# Altium footprint library PBL - SMD Packages.PcbLib: 148 footprints (part 3 of 10)
Each footprint in its own frame and in the unit in brackets; x right, y up, seen from the top. Pads: shape width x height; smd on the part's side, far side on the other; paste and mask are expansions set on the pad; w line width, h text height; cw(c..) or ccw(c..) is an arc to the next point about the centre after c.
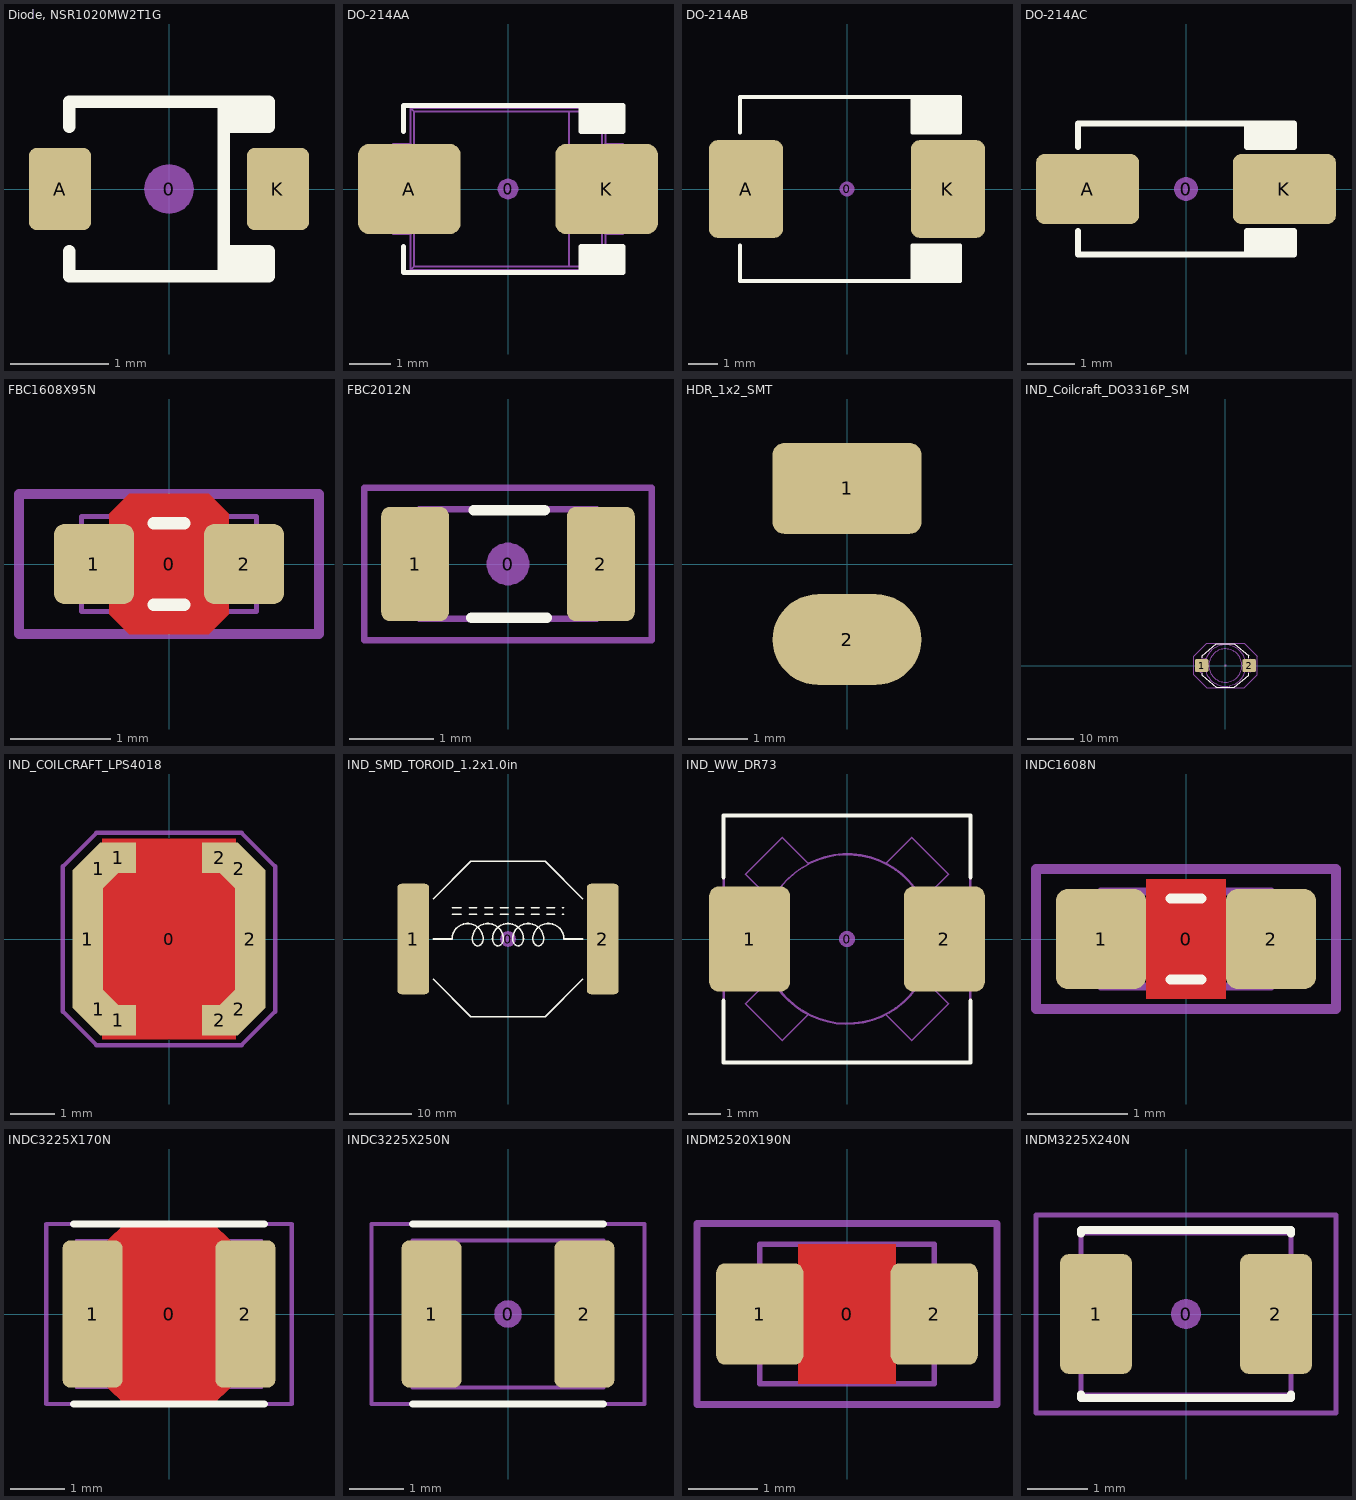
[diagram p2: the footprints below, top view; thin cyan lines are the x and y axes]

## Diode, NSR1020MW2T1G [mil]
pads (3):
  round 20 on Mech15: 0(0,0)
  rrect25% 25x33 smd: A(-43.75,0) K(43.75,0)
Top Overlay:
  lines w5: -40,-25 -40,-35 40,-35 40,-25 22,-25 ; -40,25 -40,35 40,35 40,25 22,25 ; 22,-35 22,35 ; 25,-35 25,-25 ; 25,25 25,35 ; 28,-35 28,-25 ; 28,25 28,35 ; 31,-35 31,-25 ; 31,25 31,35 ; 34,-35 34,-25 ; 34,25 34,35 ; 37,-35 37,-25 ; 37,25 37,35

## DO-214AA [mm] "JEDEC DO214 variation AA. SMB"
height 2.65
pads (3):
  round 0.508 on Mech15: 0(0,0)
  rrect25% 2.5x2.2 smd: A(-2.4,0) K(2.4,0)
Top Overlay:
  region: 1.778,1.397 1.778,2.032 2.794,2.032 2.794,1.397
  region: 1.778,-1.397 1.778,-2.032 2.794,-2.032 2.794,-1.397
  lines w0.127: -2.54,-1.397 -2.54,-2.032 1.778,-2.032 ; -2.54,1.397 -2.54,2.032 1.778,2.032 ; 1.778,-2.032 1.778,-1.397 2.794,-1.397 2.794,-2.032 1.778,-2.032 ; 1.778,2.032 2.794,2.032 2.794,1.397 1.778,1.397 1.778,2.032
13 - 3D Top Side:
  lines w0.05: -2.375,-1.1 -2.375,-1.973 ; -2.375,1.1 -2.375,1.973 ; 2.375,-1.1 2.375,-1.973 ; 2.375,1.1 2.375,1.973 ; -2.375,-1.973 -2.373,-1.975 2.373,-1.975 2.375,-1.973 ; -2.375,-1.973 -2.285,-1.883 ; -2.375,1.973 -2.373,1.975 2.373,1.975 2.375,1.973 ; -2.375,1.973 -2.285,1.883 ; -2.285,-1.883 1.485,-1.884 ; -2.285,-1.883 -2.285,1.883 ; -2.285,1.883 1.485,1.884 ; 1.485,-1.884 2.285,-1.884 ; 1.485,-1.884 1.485,1.884 ; 1.485,1.884 2.285,1.884 ; 2.285,-1.884 2.285,1.884 ; 2.285,-1.884 2.375,-1.973 ; 2.285,1.884 2.375,1.973 ; -2.8,-1.1 -2.356,-1.1 -2.356,1.1 -2.8,1.1 -2.8,-1.1 ; 2.356,-1.1 2.8,-1.1 2.8,1.1 2.356,1.1 2.356,-1.1
3D body: height 2.62, standoff 0, extent -2.8,-1.975 2.8,1.975

## DO-214AB [mm] "JEDEC DO214 variation AB. SMC"
height 2.5
pads (3):
  round 0.508 on Mech15: 0(0,0)
  rrect25% 2.5x3.3 smd: A(-3.4,0) K(3.4,0)
Top Overlay:
  rectangle: 2.2,1.9 3.8,3.1
  rectangle: 2.2,-3.1 3.8,-1.9
  lines w0.127: -3.6,-1.9 -3.6,-3.1 3.8,-3.1 3.8,-1.9 2.2,-1.9 2.2,-3.1 ; -3.6,1.9 -3.6,3.1 3.8,3.1 3.8,1.9 2.2,1.9 2.2,3.1
3D body: height 2.62, standoff 0.01, extent -3.975,-2.975 4.05,2.975

## DO-214AC [mm] "JEDEC DO214 variation AC. SMA"
height 2.5
pads (3):
  round 0.508 on Mech15: 0(0,0)
  rrect25% 2.2x1.5 smd: A(-2.1,0) K(2.1,0)
Top Overlay:
  rectangle: 1.3,-1.4 2.3,-0.9
  rectangle: 1.3,0.9 2.3,1.4
  lines w0.127: -2.3,-0.9 -2.3,-1.4 2.3,-1.4 2.3,-0.9 1.3,-0.9 1.3,-1.4 ; -2.3,0.9 -2.3,1.4 2.3,1.4 2.3,0.9 1.3,0.9 ; 1.3,0.911 1.3,1.4
3D body: height 2.42, standoff 0.02, extent -2.6,-1.3 2.6,1.3

## FBC1608X95N [mm] "Chip Ferrite, Body 1.6x0.8mm, 0603, IPC Medium Density"
height 0.95
pads (3):
  round 0.254 on Mech15: 0(0,0)
  rrect25% 0.8x0.8 smd: 1(-0.75,0) 2(0.75,0)
Top Layer:
  pour cut-out: -0.6,0.5 -0.4,0.7 0.4,0.7 0.6,0.5 0.6,-0.5 0.4,-0.7 -0.4,-0.7 -0.6,-0.5
Top Overlay:
  lines w0.127: -0.152,-0.406 0.152,-0.406 ; -0.152,0.406 0.152,0.406
13 - 3D Top Side:
  lines w0.05: -0.475,-0.475 -0.475,0.475 ; 0.475,-0.475 0.475,0.475 ; -0.875,-0.475 0.875,-0.475 0.875,0.475 -0.875,0.475 -0.875,-0.475
15 - Top Courtyards:
  lines w0.1: -1.5,-0.7 -1.5,0.7 1.5,0.7 1.5,-0.7 -1.5,-0.7
3D body: height 0.95, standoff 0, extent -0.875,-0.475 0.875,0.475

## FBC2012N [mm] "Ferrite Bead Chip, Body 2.0x1.2mm, 0805, IPC Medium Density"
height 0.9
pads (3):
  round 0.508 on Mech15: 0(0,0)
  rrect25% 0.8x1.35 smd: 1(-1.1,0) 2(1.1,0)
Top Overlay:
  lines w0.127: -0.432,-0.635 0.457,-0.635 ; -0.406,0.635 0.432,0.635
13 - 3D Top Side:
  lines w0.076: -1.05,-0.65 -1.05,0.65 1.05,0.65 1.05,-0.65 -1.05,-0.65
15 - Top Courtyards:
  lines w0.076: -1.7,-0.9 -1.7,0.9 1.7,0.9 1.7,-0.9 -1.7,-0.9
3D body: height 0.9, standoff 0, extent -1,-0.625 1,0.625

## HDR_1x2_SMT [mm]
pads (2):
  rrect25% 2.5x1.524 smd: 1(0,1.27)
  oval 2.5x1.524 smd: 2(0,-1.27)

## IND_Coilcraft_DO3316P_SM [mil] "Wire-wound Power Inductor, 2-Leads, Body 12.95x9.4mm"
height 205
pads (3):
  round 20 on Mech15: 0(0,0)
  rrect25% 115x110 smd: 1(-202.5,0) 2(202.5,0)
Top Overlay:
  lines w6: -200,-65 -200,-82.84 -76.63,-185 76.63,-185 200,-82.84 200,-65 ; -200,65 -200,82.84 -76.63,185 76.63,185 200,82.84 200,65
13 - 3D Top Side:
  drawing of 272 lines, arcs and shapes, not listed
15 - Top Courtyards:
  lines w3: -270,-80 -160,-190 160,-190 270,-80 270,80 160,190 -160,190 -270,80 -270,-80
3D body: height 172.5, standoff 0, extent -255.38,-185 255.2,185

## IND_COILCRAFT_LPS4018 [mm] "Shielded Power Inductor, Body 4.0x4.0x1.8mm"
height 1.8
pads (11):
  round 0.5 on Mech15: 0(0,0)
  rrect1% 0.7x3.124 smd: 1(-1.85,0) 2(1.85,0)
  rrect1% 0.786x0.902 smd rot 45: 1(-1.603,-1.603) 2(1.603,1.603)
  rrect1% 0.786x0.902 smd rot 135: 1(-1.603,1.603) 2(1.603,-1.603)
  rrect1% 0.812x0.7 smd: 1(-1.156,-1.85) 1(-1.156,1.85) 2(1.156,-1.85) 2(1.156,1.85)
Top Layer:
  pour cut-out: -1.524,2.286 1.524,2.286 1.524,-2.286 -1.524,-2.286
13 - 3D Top Side:
  lines w0.076: -2,-1.275 -1.275,-2 1.275,-2 2,-1.275 2,1.325 1.325,2 -1.325,2 -2,1.325 -2,-1.275
15 - Top Courtyards:
  lines w0.1: -2.413,-1.651 -2.413,1.651 -1.651,2.413 1.651,2.413 2.413,1.651 2.413,-1.651 1.651,-2.413 -1.651,-2.413 -2.413,-1.651
3D body: height 1.79, standoff -0.01, extent -2,-2 2,2

## IND_SMD_TOROID_1.2x1.0in [mm] "Inductor, Toroid, 30.5mm L x 25.4mm W x 13.5mm T"
height 13.5
pads (3):
  round 2.54 on Mech15: 0(0,0)
  rrect25% 5.1x17.8 smd: 1(-15.25,0) 2(15.25,0)
Top Overlay:
  lines w0.254: -12,-6.5 -6,-12.5 6,-12.5 12,-6.5 ; -12,0 -9,0 cw(c-6.5,0) -4,0 cw(c-5.25,0) -4.691,-1.118 cw(c-4.875,0) -5.059,-1.118 cw(c-4.5,0) -5.75,0 cw(c-3.25,0) -0.75,0 cw(c-2,0) -1.441,-1.118 cw(c-1.625,0) -1.809,-1.118 cw(c-1.25,0) -2.5,0 cw(c0,0) 2.5,0 cw(c1.25,0) 1.809,-1.118 cw(c1.625,0) 1.441,-1.118 cw(c2,0) 0.75,0 cw(c3.25,0) 5.75,0 cw(c4.5,0) 5.059,-1.118 cw(c4.875,0) 4.691,-1.118 cw(c5.25,0) 4,0 cw(c6.5,0) 9,0 12,0 ; -12,6.5 -6,12.5 6,12.5 12,6.5 ; -9,4 -7.5,4 ; -9,5 -7.5,5 ; -6.25,4 -5,4 ; -6.25,5 -5,5 ; -3.75,4 -2.5,4 ; -3.75,5 -2.5,5 ; -1.25,4 0,4 ; -1.25,5 0,5 ; 1.25,4 2.5,4 ; 1.25,5 2.5,5 ; 3.75,4 5,4 ; 3.75,5 5,5 ; 6.25,4 7.5,4 ; 6.25,5 7.5,5 ; 8.75,4 9,4 ; 8.75,5 9,5
3D body: height 12, standoff 5, extent -10.012,-10.012 10.012,10.012
3D body: height 3.5, standoff 1.5, extent -17,-12.5 17,12.5

## IND_WW_DR73 [mm] "Wire-wound power inductor, Cooper Bussmann DR73 series, IPC Medium Density"
height 3.55
pads (3):
  round 0.5 on Mech15: 0(0,0)
  rrect25% 2.5x3.25 smd: 1(-3,0) 2(3,0)
Top Overlay:
  lines w0.127: -3.81,-1.905 -3.81,-3.81 3.81,-3.81 3.81,-1.905 ; -3.81,1.905 -3.81,3.81 3.81,3.81 3.81,1.905
13 - 3D Top Side:
  circle w0.05: c0,0 r2.6
  lines w0.05: -2.574,-0.515 -2.574,-0.367 ; -2.574,0.367 -2.574,0.515 ; -2.346,-1.178 -2.346,-1.121 ; -2.346,1.121 -2.346,1.178 ; -2.273,-1.263 -2.334,-1.202 -3.129,-1.998 -1.998,-3.129 -1.202,-2.334 ; -2.273,1.263 -2.334,1.202 ; -2.202,-1.429 -2.184,-1.411 ; -2.202,1.429 -2.184,1.411 ; -1.429,-2.202 -1.411,-2.184 ; -1.263,-2.273 -1.202,-2.334 ; -1.197,-2.308 -1.202,-2.334 ; -0.237,2.589 -0.232,2.615 ; 0.232,-2.615 0.237,-2.589 ; 1.197,2.308 1.202,2.334 ; 1.202,-2.334 1.998,-3.129 3.129,-1.998 2.334,-1.202 2.273,-1.263 ; 1.263,2.273 1.202,2.334 ; 1.411,2.184 1.429,2.202 ; 2.184,-1.411 2.202,-1.429 ; 2.184,1.411 2.202,1.429 ; 2.273,1.263 2.334,1.202 3.129,1.998 1.998,3.129 1.202,2.334 ; 2.574,-0.515 2.574,-0.367 ; 2.574,0.367 2.574,0.515 ; -2.334,1.202 ccw(c0,0) -1.202,2.334 -1.998,3.129 -3.129,1.998 -2.334,1.202 ; -3.8,-3.8 -3.8,3.8 3.8,3.8 3.8,-3.8 -3.8,-3.8
15 - Top Courtyards:
  lines w0.076: -3.8,-3.8 3.8,-3.8 3.8,3.8 -3.8,3.8 -3.8,-3.8
3D body: height 3.55, standoff 0, extent -3.8,-3.8 3.8,3.8

## INDC1608N [mm] "Chip bead, Body 1.6x0.8mm, 0603, IPC Medium Density"
height 0.8
pads (3):
  round 0.254 on Mech15: 0(0,0)
  rrect25% 0.9x1 smd: 1(-0.85,0) 2(0.85,0)
Top Layer:
  pour cut-out: -0.4,0.6 0.4,0.6 0.4,-0.6 -0.4,-0.6
Top Overlay:
  lines w0.102: -0.152,-0.406 0.152,-0.406 ; -0.152,0.406 0.152,0.406
13 - 3D Top Side:
  lines w0.076: -0.85,-0.475 -0.85,0.475 0.85,0.475 0.85,-0.475 -0.85,-0.475
15 - Top Courtyards:
  lines w0.1: -1.5,-0.7 -1.5,0.7 1.5,0.7 1.5,-0.7 -1.5,-0.7
3D body: height 0.79, standoff -0.01, extent -0.8,-0.4 0.8,0.4

## INDC3225X170N [mm] "Chip Inductor, 2-Leads, Body 3.2x2.5mm, IPC Medium Density"
height 1.7
pads (3):
  round 0.508 on Mech15: 0(0,0)
  rrect25% 1.1x2.7 smd: 1(-1.4,0) 2(1.4,0)
Top Layer:
  pour cut-out: -1.125,1.35 -0.825,1.65 0.825,1.65 1.125,1.35 1.125,-1.35 0.825,-1.65 -0.825,-1.65 -1.125,-1.35
Top Overlay:
  lines w0.127: -1.75,-1.651 1.75,-1.651 ; -1.75,1.651 1.75,1.651
13 - 3D Top Side:
  lines w0.05: -1.7,-1.35 -1.7,1.35 1.7,1.35 1.7,-1.35 -1.7,-1.35
15 - Top Courtyards:
  lines w0.076: -2.25,-1.65 2.25,-1.65 2.25,1.65 -2.25,1.65 -2.25,-1.65
3D body: height 1.7, standoff 0, extent -1.71,-1.36 1.71,1.36

## INDC3225X250N [mm] "Chip Inductor, 2-Leads, Body 3.2x2.5mm, IPC Medium Density"
height 2.7
pads (3):
  round 0.508 on Mech15: 0(0,0)
  rrect25% 1.1x2.7 smd: 1(-1.4,0) 2(1.4,0)
Top Overlay:
  lines w0.127: -1.75,-1.651 1.75,-1.651 ; -1.75,1.651 1.75,1.651
13 - 3D Top Side:
  lines w0.076: -1.75,-1.35 1.75,-1.35 1.75,1.35 -1.75,1.35 -1.75,-1.35
15 - Top Courtyards:
  lines w0.076: -2.5,-1.65 2.5,-1.65 2.5,1.65 -2.5,1.65 -2.5,-1.65
3D body: height 2.7, standoff 0, extent -1.7,-1.35 1.7,1.35

## INDM2520X190N [mm] "Inductor, molded body 2.5x2.0mm"
height 1.9
pads (3):
  round 0.508 on Mech15: 0(0,0)
  rrect20% 1.25x1.45 smd: 1(-1.25,0) 2(1.25,0)
Top Layer:
  pour cut-out: -0.7,1 0.7,1 0.7,-1 -0.7,-1
13 - 3D Top Side:
  lines w0.076: -1.25,-1 1.25,-1 1.25,1 -1.25,1 -1.25,-1
15 - Top Courtyards:
  lines w0.1: -2.15,-1.3 2.15,-1.3 2.15,1.3 -2.15,1.3 -2.15,-1.3
3D body: height 1.79, standoff -0.01, extent -1.25,-1 1.25,1

## INDM3225X240N [mm] "Molded Inductor, 2-Leads, Body 3.2x2.5mm, IPC Medium Density"
height 2.4
pads (3):
  round 0.508 on Mech15: 0(0,0)
  rrect25% 1.2x2 smd: 1(-1.5,0) 2(1.5,0)
Top Overlay:
  lines w0.127: -1.75,-1.338 -1.75,-1.4 1.75,-1.4 1.75,-1.338 ; -1.75,1.338 -1.75,1.4 1.75,1.4 1.75,1.338
13 - 3D Top Side:
  lines w0.076: -1.75,-1.35 1.75,-1.35 1.75,1.35 -1.75,1.35 -1.75,-1.35
15 - Top Courtyards:
  lines w0.076: -2.5,-1.65 2.5,-1.65 2.5,1.65 -2.5,1.65 -2.5,-1.65
3D body: height 2.4, standoff 0, extent -1.79,-1.35 1.79,1.35